# Altium integrated library USBLC6-2SC6Y.IntLib: 1 symbol
Pins are listed as number, name and electrical type; pins without a type are passive.

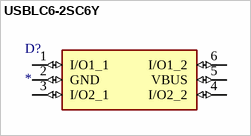
[diagram p0: symbol USBLC6-2SC6Y]

## USBLC6-2SC6Y
designator D?
17V Clamp 5A (8/20µs) Ipp Tvs Diode Surface Mount SOT-23-6; MF: STMicroelectronics; MP: USBLC6-2SC6Y; SnapEDA_Link: https://www.snapeda.com/parts/USBLC6-2SC6Y/STMicroelectronics/view-part/?ref=snap; Package: SOT-23-6 STMicroelectronics; Value: *; Check_prices: https://www.snapeda.com/parts/USBLC6-2SC6Y/STMicroelectronics/view-part/?ref=eda
footprint SOT95P280X145-6N
pins: 1 I/O1_1 (io), 2 GND (io), 3 I/O2_1 (io), 4 I/O2_2 (io), 5 VBUS (io), 6 I/O1_2 (io)